# Altium footprint library J0011D21BNL.PcbLib: 1 footprints
Each footprint in its own frame and in the unit in brackets; x right, y up, seen from the top. Pads: shape width x height; smd on the part's side, far side on the other; paste and mask are expansions set on the pad; w line width, h text height; cw(c..) or ccw(c..) is an arc to the next point about the centre after c.
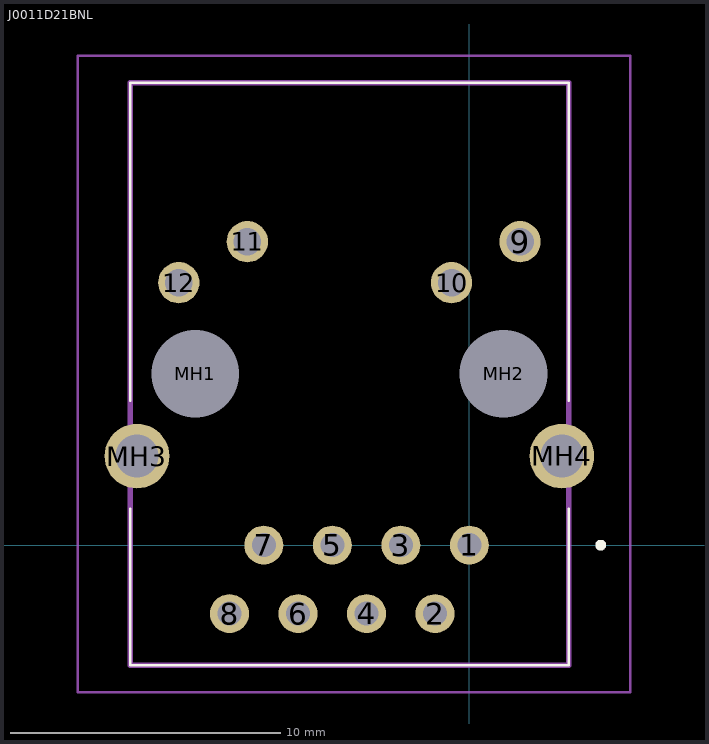
[diagram p0: the footprint, top view; thin cyan lines are the x and y axes]

## J0011D21BNL [mm]
pads (16):
  round 1.446 hole 0.89: 1(0,0) 2(-1.27,-2.54) 3(-2.54,0) 4(-3.81,-2.54) 5(-5.08,0) 6(-6.35,-2.54) 7(-7.62,0) 8(-8.89,-2.54)
  round 1.53 hole 1.02: 9(1.88,11.25) 10(-0.66,9.73) 11(-8.23,11.25) 12(-10.77,9.73)
  round 1.625 hole 3.25 unplated: MH1(-10.16,6.35) MH2(1.27,6.35)
  round 2.4 hole 1.6: MH3(-12.32,3.3) MH4(3.43,3.3)
Top Overlay:
  lines w0.1: -12.575,1.35 -12.575,-4.45 3.685,-4.45 3.685,1.35 ; -12.575,5.35 -12.575,17.14 3.685,17.14 3.685,5.35
  lines w0.2: 4.77,0 4.77,0 ; 4.77,0 ccw(c4.87,0) 4.97,0 ; 4.77,0 cw(c4.87,0) 4.97,0 ; 4.97,0 4.97,0
Mechanical 15:
  lines w0.2: -12.575,-4.45 3.685,-4.45 3.685,17.14 -12.575,17.14 -12.575,-4.45
Mechanical 20:
  lines w0.1: -14.52,-5.45 5.97,-5.45 5.97,18.14 -14.52,18.14 -14.52,-5.45